# Altium footprint library FootPrintLib_10.PcbLib: 270 footprints (part 13 of 17)
Each footprint in its own frame and in the unit in brackets; x right, y up, seen from the top. Pads: shape width x height; smd on the part's side, far side on the other; paste and mask are expansions set on the pad; w line width, h text height; cw(c..) or ccw(c..) is an arc to the next point about the centre after c.
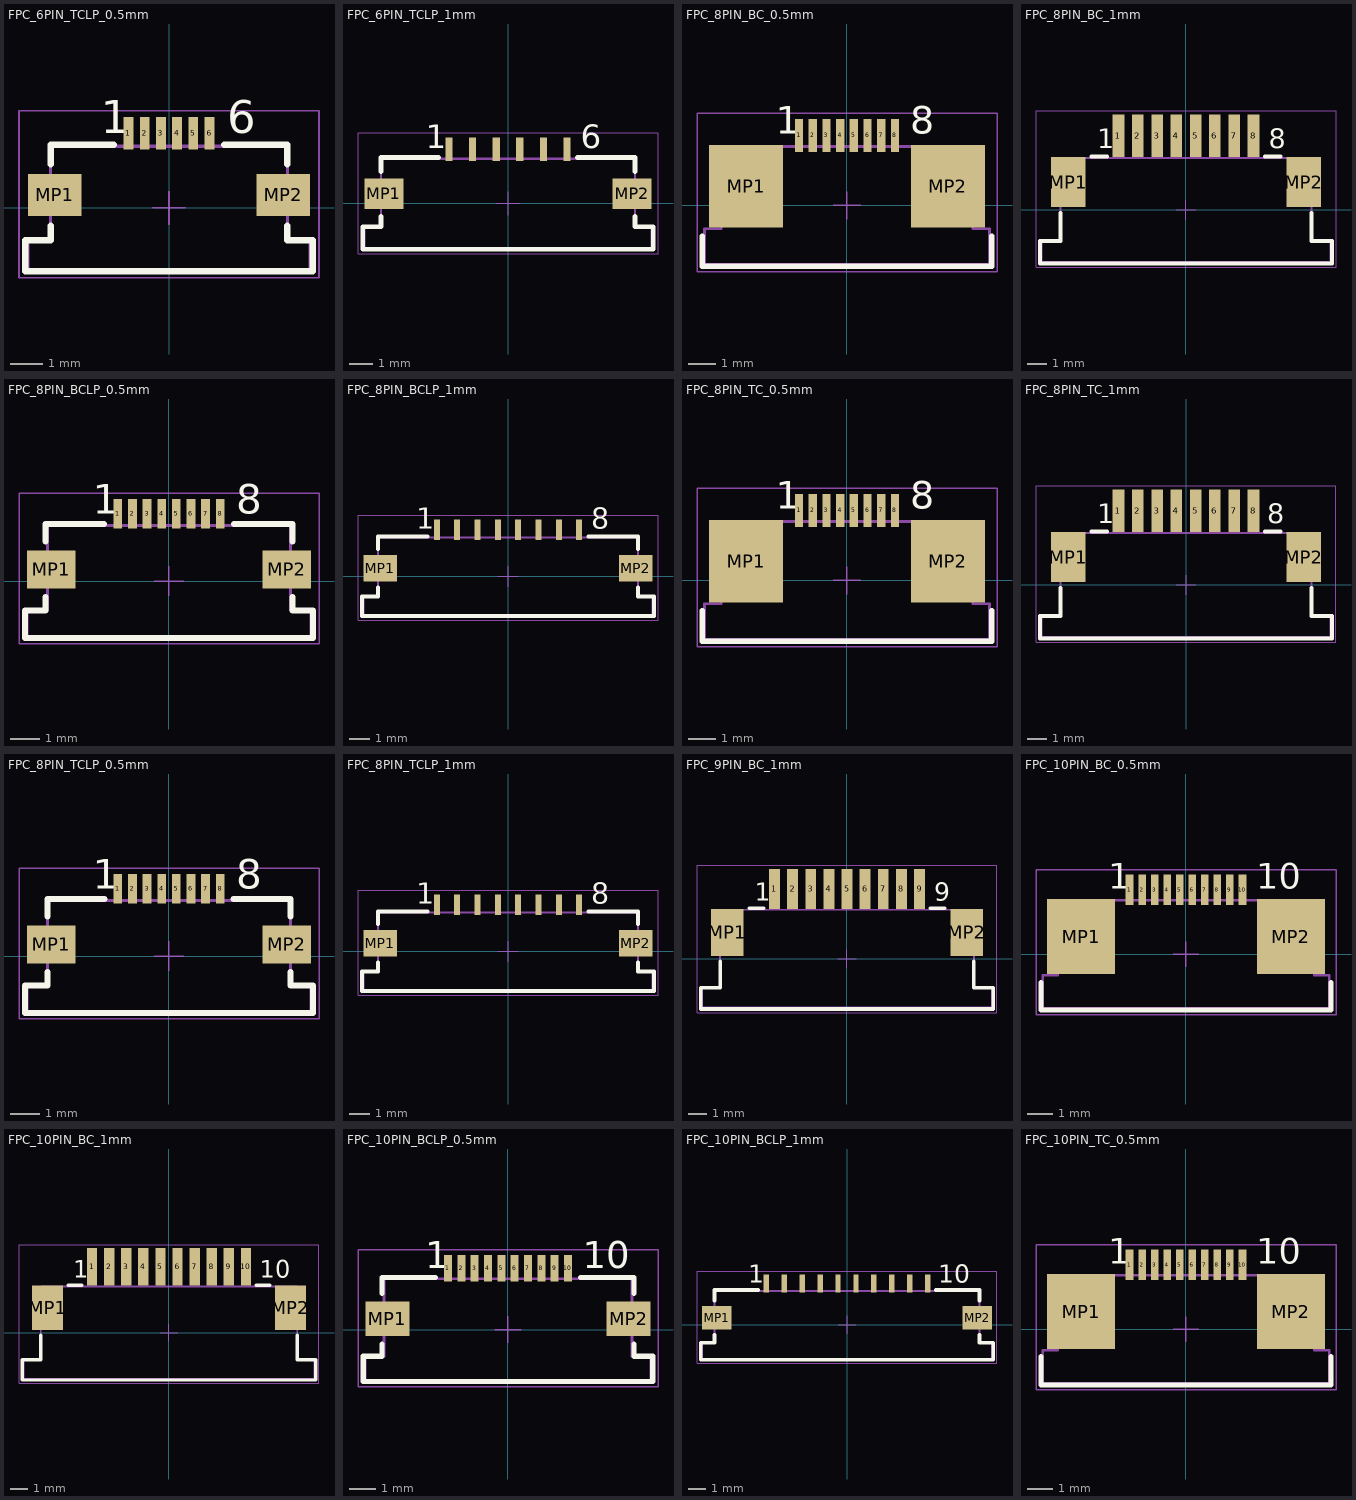
[diagram p12: the footprints below, top view; thin cyan lines are the x and y axes]

## FPC_6PIN_TCLP_0.5mm [mm] "ZIF Connectors, Horizontal, Top Contact Low Profile, pitch 0.5mm, 6p"
height 1.3
pads (8):
  rect 0.3x1 smd: 1(-1.25,2.3) 2(-0.75,2.3) 3(-0.25,2.3) 4(0.25,2.3) 5(0.75,2.3) 6(1.25,2.3)
  rect 1.65x1.3 smd: MP1(-3.525,0.4) MP2(3.525,0.4)
Top Overlay:
  lines w0.2: -3.65,-0.55 -3.65,-1 -4.425,-1 -4.425,-1.95 4.425,-1.95 4.425,-1 3.65,-1 3.65,-0.55 ; -3.65,1.35 -3.65,1.95 -1.7,1.95 ; 1.7,1.95 3.65,1.95 3.65,1.35
  text "1" at -2.1,2.3 h1.02
  text "6" at 1.8,2.3 h1.02
Mechanical 13:
  lines w0.1: -4.35,-1.9 -4.35,-1 -3.65,-1 -3.65,1.9 3.65,1.9 3.65,-1 4.35,-1 4.35,-1.9 -4.35,-1.9
Mechanical 15:
  lines w0.05: -0.5,0 0.5,0 ; 0,-0.5 0,0.5 ; -4.625,-2.15 -4.625,3 4.625,3 4.625,-2.15 -4.625,-2.15
3D body "687106183622.stp": height 1.28, standoff -0.01, extent -4.35,-1.9 4.35,2.35

## FPC_6PIN_TCLP_1mm [mm] "ZIF Connectors, Horizontal, Top Contact Low Profile, pitch 1mm, 6p"
height 1.3
pads (8):
  rect 0.3x1 smd: 1(-2.5,2.3) 2(-1.5,2.3) 3(-0.5,2.3) 4(0.5,2.3) 5(1.5,2.3) 6(2.5,2.3)
  rect 1.65x1.3 smd: MP1(-5.275,0.4) MP2(5.275,0.4)
Top Overlay:
  lines w0.2: -5.4,-0.55 -5.4,-1 -6.175,-1 -6.175,-1.95 6.175,-1.95 6.175,-1 5.4,-1 5.4,-0.55 ; -5.4,1.35 -5.4,1.95 -2.95,1.95 ; 2.95,1.95 5.4,1.95 5.4,1.35
  text "1" at -3.5,2.35 h1.02
  text "6" at 3.1,2.35 h1.02
Mechanical 13:
  lines w0.1: -6.1,-1 -5.4,-1 -5.4,1.9 5.4,1.9 5.4,-1 6.1,-1 6.1,-1.9 -6.1,-1.9 -6.1,-1 ; -6.1,-1 -6.1,-1
Mechanical 15:
  lines w0.05: -0.5,0 0.5,0 ; 0,-0.5 0,0.5 ; -6.375,-2.15 6.375,-2.15 6.375,3 -6.375,3 -6.375,-2.15
3D body "686106183422.stp": height 1.28, standoff -0.01, extent -6.1,-1.9 6.1,2.35

## FPC_8PIN_BC_0.5mm [mm] "ZIF Connectors, Horizontal, Bottom Contact, pitch 0.5mm, 8p"
height 2.25
pads (10):
  rect 0.3x1.2 smd: 1(-1.75,2.56) 2(-1.25,2.56) 3(-0.75,2.56) 4(-0.25,2.56) 5(0.25,2.56) 6(0.75,2.56) 7(1.25,2.56) 8(1.75,2.56)
  rect 2.7x3 smd: MP1(-3.68,0.7) MP2(3.68,0.7)
Top Overlay:
  lines w0.2: -5.275,-1.125 -5.275,-2.225 5.275,-2.225 5.275,-1.125
  text "8" at 2.3,2.61 h1.02
  text "1" at -2.6,2.61 h1.02
Mechanical 13:
  lines w0.1: -5.2,-2.15 5.2,-2.15 5.2,-0.85 4.6,-0.85 4.6,2.15 -4.6,2.15 -4.6,-0.85 -5.2,-0.85 -5.2,-2.15
Mechanical 15:
  lines w0.05: -0.5,0 0.5,0 ; 0,-0.5 0,0.5 ; -5.475,-2.425 -5.475,3.36 5.475,3.36 5.475,-2.425 -5.475,-2.425
3D body "68710814522.stp": height 2.1, standoff 0, extent -5.2,-2.15 5.2,2.95

## FPC_8PIN_BC_1mm [mm] "ZIF Connectors, Horizontal, Bottom Contact, pitch 1mm, 8p"
height 3.15
pads (10):
  rect 0.6x2.2 smd: 1(-3.5,3.85) 2(-2.5,3.85) 3(-1.5,3.85) 4(-0.5,3.85) 5(0.5,3.85) 6(1.5,3.85) 7(2.5,3.85) 8(3.5,3.85)
  rect 1.8x2.6 smd: MP1(-6.1,1.45) MP2(6.1,1.45)
Top Overlay:
  lines w0.2: -6.5,-0.15 -6.5,-1.6 -7.575,-1.6 -7.575,-2.775 7.575,-2.775 7.575,-1.6 6.5,-1.6 6.5,-0.15 ; -4.9,2.775 -4.1,2.775 ; 4.1,2.775 4.9,2.775
  text "1" at -4.6,3.2 h1.02
  text "8" at 4.3,3.2 h1.02
Mechanical 13:
  lines w0.1: -7.5,-2.7 7.5,-2.7 7.5,-1.6 6.5,-1.6 6.5,2.7 -6.5,2.7 -6.5,-1.6 -7.5,-1.6 -7.5,-2.7
Mechanical 15:
  lines w0.05: -0.5,0 0.5,0 ; 0,-0.5 0,0.5 ; -7.775,-2.975 7.775,-2.975 7.775,5.15 -7.775,5.15 -7.775,-2.975
3D body "68610814422.stp": height 3.02, standoff 0.01, extent -7.5,-2.7 7.5,4.4

## FPC_8PIN_BCLP_0.5mm [mm] "ZIF Connectors, Horizontal, Bottom Contact Low Profile, pitch 0.5mm, 8p"
height 1.3
pads (10):
  rect 0.3x1 smd: 1(-1.75,2.3) 2(-1.25,2.3) 3(-0.75,2.3) 4(-0.25,2.3) 5(0.25,2.3) 6(0.75,2.3) 7(1.25,2.3) 8(1.75,2.3)
  rect 1.65x1.3 smd: MP1(-4.025,0.4) MP2(4.025,0.4)
Top Overlay:
  lines w0.2: -4.225,-0.55 -4.225,-1 -4.925,-1 -4.925,-1.95 4.925,-1.95 4.925,-1 4.225,-1 4.225,-0.55 ; -4.225,1.35 -4.225,1.95 -2.225,1.95 ; 2.225,1.95 4.225,1.95 4.225,1.35
  text "8" at 2.3,2.3 h1.02
  text "1" at -2.6,2.3 h1.02
Mechanical 13:
  lines w0.1: -4.85,-1.9 4.85,-1.9 4.85,-1 4.15,-1 4.15,1.9 -4.15,1.9 -4.15,-1 -4.85,-1 -4.85,-1.9
Mechanical 15:
  lines w0.05: -0.5,0 0.5,0 ; 0,-0.5 0,0.5 ; -5.125,-2.15 5.125,-2.15 5.125,3 -5.125,3 -5.125,-2.15
3D body "687108183722.stp": height 1.28, standoff -0.01, extent -4.85,-1.9 4.85,2.35

## FPC_8PIN_BCLP_1mm [mm] "ZIF Connectors, Horizontal, Bottom Contact Low Profile, pitch 1mm, 8p"
height 1.3
pads (10):
  rect 0.3x1 smd: 1(-3.5,2.3) 2(-2.5,2.3) 3(-1.5,2.3) 4(-0.5,2.3) 5(0.5,2.3) 6(1.5,2.3) 7(2.5,2.3) 8(3.5,2.3)
  rect 1.65x1.3 smd: MP1(-6.275,0.4) MP2(6.275,0.4)
Top Overlay:
  lines w0.2: -6.4,-0.55 -6.4,-1 -7.175,-1 -7.175,-1.95 7.175,-1.95 7.175,-1 6.4,-1 6.4,-0.55 ; -6.4,1.35 -6.4,1.95 -3.95,1.95 ; 3.95,1.95 6.4,1.95 6.4,1.35
  text "8" at 4.1,2.35 h1.02
  text "1" at -4.5,2.35 h1.02
Mechanical 13:
  lines w0.1: -7.1,-1 -7.1,-1.9 7.1,-1.9 7.1,-1 6.4,-1 6.4,1.9 -6.4,1.9 -6.4,-1 -7.1,-1 ; -7.1,-1 -7.1,-1
Mechanical 15:
  lines w0.05: -0.5,0 0.5,0 ; 0,-0.5 0,0.5 ; -7.375,-2.15 -7.375,3 7.375,3 7.375,-2.15 -7.375,-2.15
3D body "686108183522.stp": height 1.24, standoff -0.01, extent -7.1,-1.9 7.1,2.35

## FPC_8PIN_TC_0.5mm [mm] "ZIF Connectors, Horizontal, Top Contact, pitch 0.5mm, 8p"
height 2.25
pads (10):
  rect 0.3x1.2 smd: 1(-1.75,2.56) 2(-1.25,2.56) 3(-0.75,2.56) 4(-0.25,2.56) 5(0.25,2.56) 6(0.75,2.56) 7(1.25,2.56) 8(1.75,2.56)
  rect 2.7x3 smd: MP1(-3.68,0.7) MP2(3.68,0.7)
Top Overlay:
  lines w0.2: -5.275,-1.1 -5.275,-2.225 5.275,-2.225 5.275,-1.1
  text "1" at -2.6,2.61 h1.02
  text "8" at 2.3,2.61 h1.02
Mechanical 13:
  lines w0.1: -5.2,-2.15 -5.2,-0.85 -4.6,-0.85 -4.6,2.15 4.6,2.15 4.6,-0.85 5.2,-0.85 5.2,-2.15 -5.2,-2.15
Mechanical 15:
  lines w0.05: -0.5,0 0.5,0 ; 0,-0.5 0,0.5 ; -5.475,-2.425 -5.475,3.36 5.475,3.36 5.475,-2.425 -5.475,-2.425
3D body "68710814022.stp": height 2.1, standoff 0, extent -5.2,-2.15 5.2,2.95

## FPC_8PIN_TC_1mm [mm] "ZIF Connectors, Horizontal, Top Contact, pitch 1mm, 8p"
height 3.15
pads (10):
  rect 0.6x2.2 smd: 1(-3.5,3.85) 2(-2.5,3.85) 3(-1.5,3.85) 4(-0.5,3.85) 5(0.5,3.85) 6(1.5,3.85) 7(2.5,3.85) 8(3.5,3.85)
  rect 1.8x2.6 smd: MP1(-6.1,1.45) MP2(6.1,1.45)
Top Overlay:
  lines w0.2: -6.5,-0.15 -6.5,-1.6 -7.575,-1.6 -7.575,-2.775 7.575,-2.775 7.575,-1.6 6.5,-1.6 6.5,-0.15 ; -4.9,2.775 -4.1,2.775 ; 4.1,2.775 4.9,2.775
  text "1" at -4.6,3.2 h1.02
  text "8" at 4.2,3.2 h1.02
Mechanical 13:
  lines w0.1: -7.5,-2.7 7.5,-2.7 7.5,-1.6 6.5,-1.6 6.5,2.7 -6.5,2.7 -6.5,-1.6 -7.5,-1.6 -7.5,-2.7
Mechanical 15:
  lines w0.05: -0.5,0 0.5,0 ; 0,-0.5 0,0.5 ; -7.775,-2.975 -7.775,5.15 7.775,5.15 7.775,-2.975 -7.775,-2.975
3D body "68610814122.stp": height 3.02, standoff 0.02, extent -7.5,-2.7 7.5,4.4

## FPC_8PIN_TCLP_0.5mm [mm] "ZIF Connectors, Horizontal, Top Contact Low Profile, pitch 0.5mm, 8p"
height 1.3
pads (10):
  rect 0.3x1 smd: 1(-1.75,2.3) 2(-1.25,2.3) 3(-0.75,2.3) 4(-0.25,2.3) 5(0.25,2.3) 6(0.75,2.3) 7(1.25,2.3) 8(1.75,2.3)
  rect 1.65x1.3 smd: MP1(-4.025,0.4) MP2(4.025,0.4)
Top Overlay:
  lines w0.2: -4.15,-0.55 -4.15,-1 -4.925,-1 -4.925,-1.95 4.925,-1.95 4.925,-1 4.15,-1 4.15,-0.55 ; -4.15,1.35 -4.15,1.95 -2.2,1.95 ; 2.2,1.95 4.15,1.95 4.15,1.35
  text "1" at -2.6,2.3 h1.02
  text "8" at 2.3,2.3 h1.02
Mechanical 13:
  lines w0.1: -4.85,-1.9 4.85,-1.9 4.85,-1 4.15,-1 4.15,1.9 -4.15,1.9 -4.15,-1 -4.85,-1 -4.85,-1.9
Mechanical 15:
  lines w0.05: -0.5,0 0.5,0 ; 0,-0.5 0,0.5 ; -5.125,-2.15 5.125,-2.15 5.125,3 -5.125,3 -5.125,-2.15
3D body "687108183622.stp": height 1.28, standoff -0.01, extent -4.85,-1.9 4.85,2.35

## FPC_8PIN_TCLP_1mm [mm] "ZIF Connectors, Horizontal, Top Contact Low Profile, pitch 1mm, 8p"
height 1.3
pads (10):
  rect 0.3x1 smd: 1(-3.5,2.3) 2(-2.5,2.3) 3(-1.5,2.3) 4(-0.5,2.3) 5(0.5,2.3) 6(1.5,2.3) 7(2.5,2.3) 8(3.5,2.3)
  rect 1.65x1.3 smd: MP1(-6.275,0.4) MP2(6.275,0.4)
Top Overlay:
  lines w0.2: -6.4,-0.55 -6.4,-1 -7.175,-1 -7.175,-1.95 7.175,-1.95 7.175,-1 6.4,-1 6.4,-0.55 ; -6.4,1.35 -6.4,1.95 -3.95,1.95 ; 3.95,1.95 6.4,1.95 6.4,1.35
  text "1" at -4.5,2.35 h1.02
  text "8" at 4.1,2.35 h1.02
Mechanical 13:
  lines w0.1: -7.1,-1 -7.1,-1.9 7.1,-1.9 7.1,-1 6.4,-1 6.4,1.9 -6.4,1.9 -6.4,-1 -7.1,-1 ; -7.1,-1 -7.1,-1
Mechanical 15:
  lines w0.05: -0.5,0 0.5,0 ; 0,-0.5 0,0.5 ; -7.375,-2.15 -7.375,3 7.375,3 7.375,-2.15 -7.375,-2.15
3D body "686108183422.stp": height 1.28, standoff -0.01, extent -7.1,-1.9 7.1,2.35

## FPC_9PIN_BC_1mm [mm] "ZIF Connectors, Horizontal, Bottom Contact, pitch 1mm, 9p"
height 3.15
pads (11):
  rect 0.6x2.2 smd: 1(-4,3.85) 2(-3,3.85) 3(-2,3.85) 4(-1,3.85) 5(0,3.85) 6(1,3.85) 7(2,3.85) 8(3,3.85) 9(4,3.85)
  rect 1.8x2.6 smd: MP1(-6.6,1.45) MP2(6.6,1.45)
Top Overlay:
  lines w0.2: -7,-0.15 -7,-1.6 -8.075,-1.6 -8.075,-2.775 8.075,-2.775 8.075,-1.6 7,-1.6 7,-0.15 ; -5.4,2.775 -4.6,2.775 ; 4.6,2.775 5.4,2.775
  text "9" at 4.8,3.2 h1.02
  text "1" at -5.1,3.2 h1.02
Mechanical 13:
  lines w0.1: -8,-2.7 8,-2.7 8,-1.6 7,-1.6 7,2.7 -7,2.7 -7,-1.6 -8,-1.6 -8,-2.7
Mechanical 15:
  lines w0.05: -0.5,0 0.5,0 ; 0,-0.5 0,0.5 ; -8.275,-2.975 8.275,-2.975 8.275,5.15 -8.275,5.15 -8.275,-2.975
3D body "68610914422.stp": height 3.02, standoff 0.01, extent -8,-2.7 8,4.4

## FPC_10PIN_BC_0.5mm [mm] "ZIF Connectors, Horizontal, Bottom Contact, pitch 0.5mm, 10p"
height 2.25
pads (12):
  rect 0.3x1.2 smd: 1(-2.25,2.56) 2(-1.75,2.56) 3(-1.25,2.56) 4(-0.75,2.56) 5(-0.25,2.56) 6(0.25,2.56) 7(0.75,2.56) 8(1.25,2.56) 9(1.75,2.56) 10(2.25,2.56)
  rect 2.7x3 smd: MP1(-4.18,0.7) MP2(4.18,0.7)
Top Overlay:
  lines w0.2: -5.775,-1.125 -5.775,-2.225 5.775,-2.225 5.775,-1.125
  text "10" at 2.8,2.61 h1.02
  text "1" at -3.1,2.61 h1.02
Mechanical 13:
  lines w0.1: -5.7,-2.15 -5.7,-0.85 -5.1,-0.85 -5.1,2.15 5.1,2.15 5.1,-0.85 5.7,-0.85 5.7,-2.15 -5.7,-2.15
Mechanical 15:
  lines w0.05: -0.5,0 0.5,0 ; 0,-0.5 0,0.5 ; -5.975,-2.425 5.975,-2.425 5.975,3.36 -5.975,3.36 -5.975,-2.425
3D body "68711014522.stp": height 2.1, standoff 0, extent -5.7,-2.15 5.7,2.95

## FPC_10PIN_BC_1mm [mm] "ZIF Connectors, Horizontal, Bottom Contact, pitch 1mm, 10p"
height 3.15
pads (12):
  rect 0.6x2.2 smd: 1(-4.5,3.85) 2(-3.5,3.85) 3(-2.5,3.85) 4(-1.5,3.85) 5(-0.5,3.85) 6(0.5,3.85) 7(1.5,3.85) 8(2.5,3.85) 9(3.5,3.85) 10(4.5,3.85)
  rect 1.8x2.6 smd: MP1(-7.1,1.45) MP2(7.1,1.45)
Top Overlay:
  lines w0.2: -7.5,-0.15 -7.5,-1.6 -8.575,-1.6 -8.575,-2.775 8.575,-2.775 8.575,-1.6 7.5,-1.6 7.5,-0.15 ; -5.9,2.775 -5.1,2.775 ; 5.1,2.775 5.9,2.775
  text "10" at 5.3,3.2 h1.02
  text "1" at -5.6,3.2 h1.02
Mechanical 13:
  lines w0.1: -8.5,-2.7 -8.5,-1.6 -7.5,-1.6 -7.5,2.7 7.5,2.7 7.5,-1.6 8.5,-1.6 8.5,-2.7 -8.5,-2.7
Mechanical 15:
  lines w0.05: -0.5,0 0.5,0 ; 0,-0.5 0,0.5 ; -8.775,-2.975 -8.775,5.15 8.775,5.15 8.775,-2.975 -8.775,-2.975
3D body "68611014422.stp": height 3.02, standoff 0.01, extent -8.5,-2.7 8.5,4.4

## FPC_10PIN_BCLP_0.5mm [mm] "ZIF Connectors, Horizontal, Bottom Contact Low Profile, pitch 0.5mm, 10p"
height 1.3
pads (12):
  rect 0.3x1 smd: 1(-2.25,2.3) 2(-1.75,2.3) 3(-1.25,2.3) 4(-0.75,2.3) 5(-0.25,2.3) 6(0.25,2.3) 7(0.75,2.3) 8(1.25,2.3) 9(1.75,2.3) 10(2.25,2.3)
  rect 1.65x1.3 smd: MP1(-4.525,0.4) MP2(4.525,0.4)
Top Overlay:
  lines w0.2: -4.725,-0.55 -4.725,-1 -5.425,-1 -5.425,-1.95 5.425,-1.95 5.425,-1 4.725,-1 4.725,-0.55 ; -4.725,1.35 -4.725,1.95 -2.725,1.95 ; 2.725,1.95 4.725,1.95 4.725,1.35
  text "10" at 2.8,2.3 h1.02
  text "1" at -3.1,2.3 h1.02
Mechanical 13:
  lines w0.1: -5.35,-1.9 -5.35,-1 -4.65,-1 -4.65,1.9 4.65,1.9 4.65,-1 5.35,-1 5.35,-1.9 -5.35,-1.9
Mechanical 15:
  lines w0.05: -0.5,0 0.5,0 ; 0,-0.5 0,0.5 ; -5.625,-2.15 -5.625,3 5.625,3 5.625,-2.15 -5.625,-2.15
3D body "687110183722.stp": height 1.28, standoff -0.01, extent -5.35,-1.9 5.35,2.35

## FPC_10PIN_BCLP_1mm [mm] "ZIF Connectors, Horizontal, Bottom Contact Low Profile, pitch 1mm, 10p"
height 1.3
pads (12):
  rect 0.3x1 smd: 1(-4.5,2.3) 2(-3.5,2.3) 3(-2.5,2.3) 4(-1.5,2.3) 5(-0.5,2.3) 6(0.5,2.3) 7(1.5,2.3) 8(2.5,2.3) 9(3.5,2.3) 10(4.5,2.3)
  rect 1.65x1.3 smd: MP1(-7.275,0.4) MP2(7.275,0.4)
Top Overlay:
  lines w0.2: -7.4,-0.55 -7.4,-1 -8.175,-1 -8.175,-1.95 8.175,-1.95 8.175,-1 7.4,-1 7.4,-0.55 ; -7.4,1.35 -7.4,1.95 -4.95,1.95 ; 4.95,1.95 7.4,1.95 7.4,1.35
  text "10" at 5.1,2.35 h1.02
  text "1" at -5.5,2.35 h1.02
Mechanical 13:
  lines w0.1: -8.1,-1 -7.4,-1 -7.4,1.9 7.4,1.9 7.4,-1 8.1,-1 8.1,-1.9 -8.1,-1.9 -8.1,-1 ; -8.1,-1 -8.1,-1
Mechanical 15:
  lines w0.05: -0.5,0 0.5,0 ; 0,-0.5 0,0.5 ; -8.375,-2.15 8.375,-2.15 8.375,3 -8.375,3 -8.375,-2.15
3D body "686110183522.stp": height 1.24, standoff -0.01, extent -8.1,-1.9 8.1,2.35

## FPC_10PIN_TC_0.5mm [mm] "ZIF Connectors, Horizontal, Top Contact, pitch 0.5mm, 10p"
height 2.25
pads (12):
  rect 0.3x1.2 smd: 1(-2.25,2.56) 2(-1.75,2.56) 3(-1.25,2.56) 4(-0.75,2.56) 5(-0.25,2.56) 6(0.25,2.56) 7(0.75,2.56) 8(1.25,2.56) 9(1.75,2.56) 10(2.25,2.56)
  rect 2.7x3 smd: MP1(-4.18,0.7) MP2(4.18,0.7)
Top Overlay:
  lines w0.2: -5.775,-1.1 -5.775,-2.225 5.775,-2.225 5.775,-1.1
  text "10" at 2.8,2.61 h1.02
  text "1" at -3.1,2.61 h1.02
Mechanical 13:
  lines w0.1: -5.7,-2.15 -5.7,-0.85 -5.1,-0.85 -5.1,2.15 5.1,2.15 5.1,-0.85 5.7,-0.85 5.7,-2.15 -5.7,-2.15
Mechanical 15:
  lines w0.05: -0.5,0 0.5,0 ; 0,-0.5 0,0.5 ; -5.975,-2.425 -5.975,3.36 5.975,3.36 5.975,-2.425 -5.975,-2.425
3D body "68711014022.stp": height 2.1, standoff 0, extent -5.7,-2.15 5.7,2.95